# Altium footprint library Footprint-Lib-PhilsLab.PcbLib: 544 footprints (part 26 of 34)
Each footprint in its own frame and in the unit in brackets; x right, y up, seen from the top. Pads: shape width x height; smd on the part's side, far side on the other; paste and mask are expansions set on the pad; w line width, h text height; cw(c..) or ccw(c..) is an arc to the next point about the centre after c.
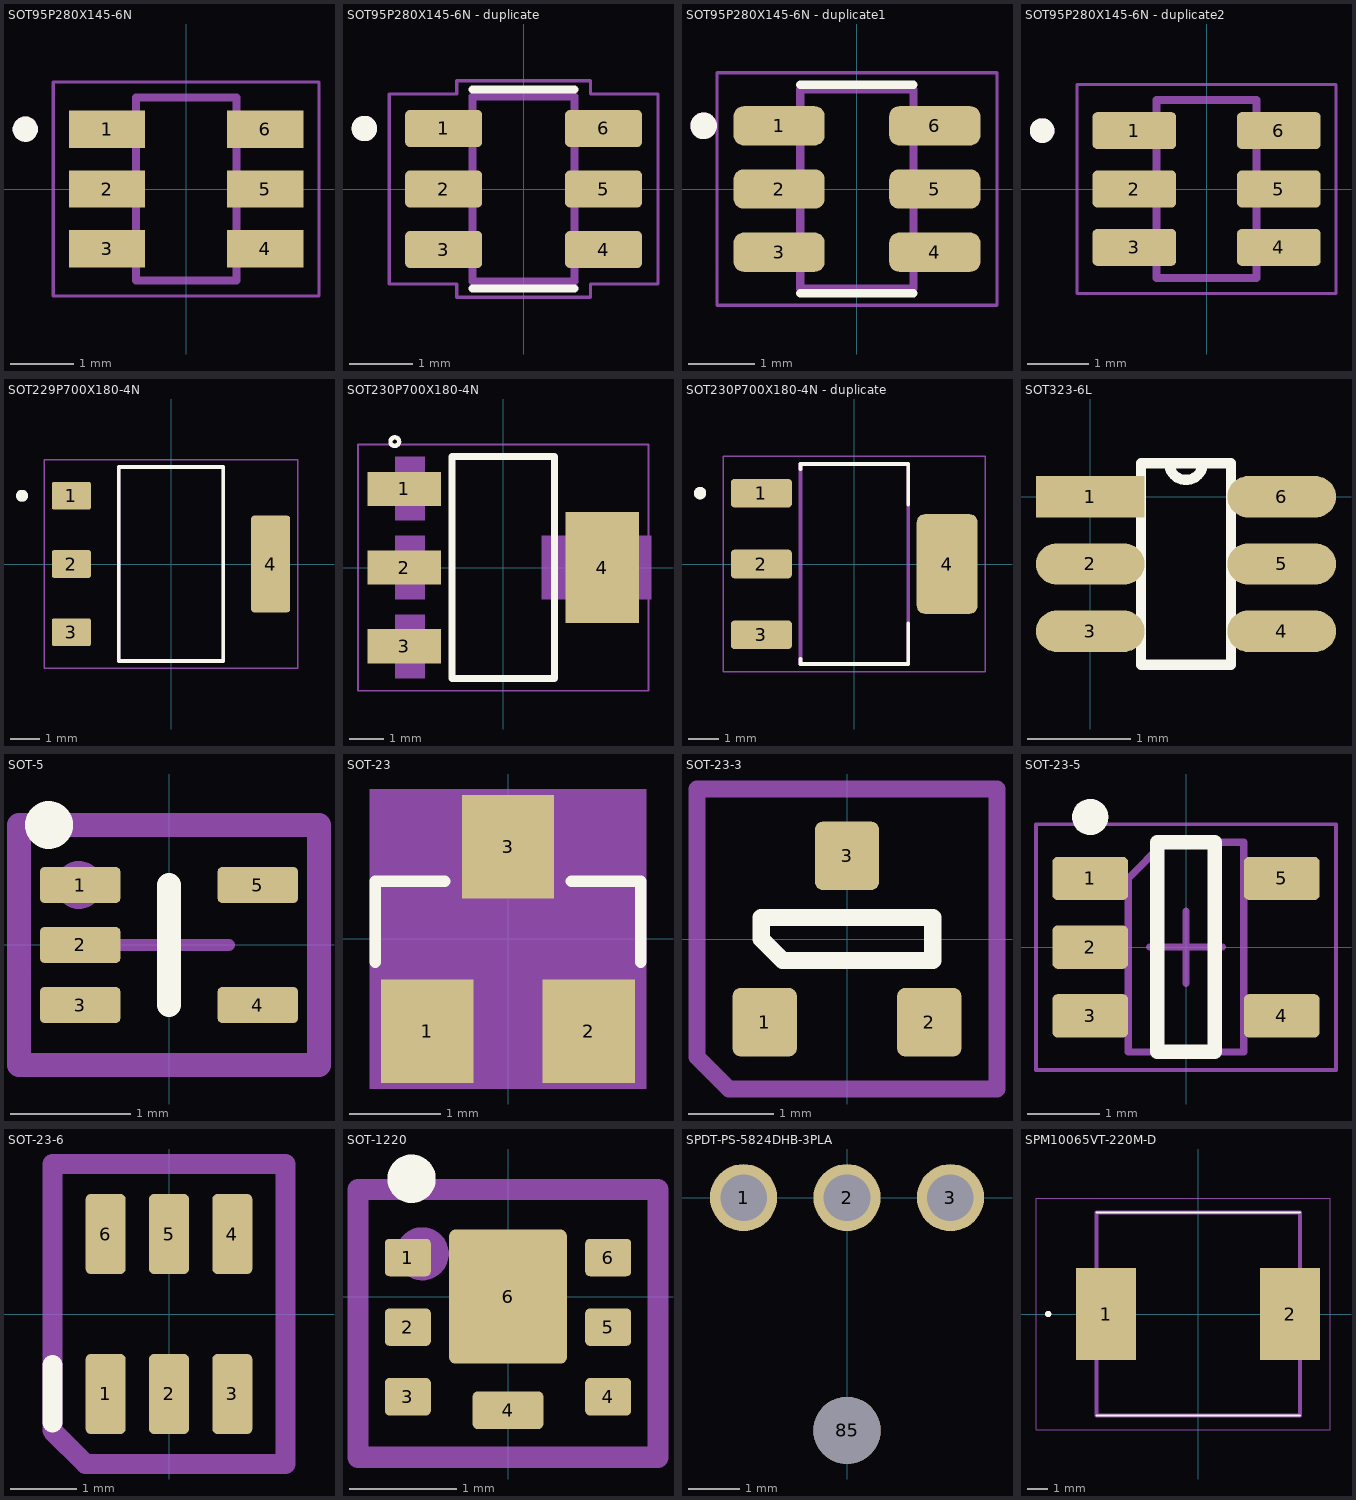
[diagram p25: the footprints below, top view; thin cyan lines are the x and y axes]

## SOT95P280X145-6N [mm]
height 1.45
pads (6):
  rect 1.21x0.59 smd: 1(-1.255,0.95) 2(-1.255,0) 3(-1.255,-0.95) 4(1.255,-0.95) 5(1.255,0) 6(1.255,0.95)
Top Overlay:
  circle w0.2: c-2.555,0.95 r0.1
Mechanical 13:
  circle w0.2: c-2.555,0.95 r0.1
  lines w0.127: -0.8,-1.45 0.8,-1.45 0.8,1.45 -0.8,1.45 -0.8,-1.45
Mechanical 15:
  lines w0.05: -2.11,-1.7 -2.11,1.7 2.11,1.7 2.11,-1.7 -2.11,-1.7
3D body "step_temp.STEP": height 1.45, standoff 0, extent -1.4,-1.45 1.4,1.45

## SOT95P280X145-6N - duplicate [mm]
pads (6):
  rrect25% 1.21x0.58 smd: 1(-1.255,0.95) 2(-1.255,0) 3(-1.255,-0.95) 4(1.255,-0.95) 5(1.255,0) 6(1.255,0.95)
Top Overlay:
  circle w0.2: c-2.5,0.95 r0.1
  lines w0.127: -0.8,-1.56 0.8,-1.56 ; -0.8,1.56 0.8,1.56
Mechanical 13:
  circle w0.2: c-2.5,0.95 r0.1
  lines w0.127: -0.8,-1.45 0.8,-1.45 0.8,1.45 -0.8,1.45 -0.8,-1.45
Mechanical 15:
  lines w0.05: -2.11,-1.49 -1.05,-1.49 -1.05,-1.7 1.05,-1.7 1.05,-1.49 2.11,-1.49 2.11,1.49 1.05,1.49 1.05,1.7 -1.05,1.7 -1.05,1.49 -2.11,1.49 -2.11,-1.49
3D body "step_temp.STEP": height 1.45, standoff 0, extent -1.4,-1.45 1.4,1.45

## SOT95P280X145-6N - duplicate1 [mm]
height 1.45
pads (6):
  rrect50% 1.37x0.59 smd: 1(-1.17,0.95) 2(-1.17,0) 3(-1.17,-0.95) 4(1.17,-0.95) 5(1.17,0) 6(1.17,0.95)
Top Overlay:
  circle w0.2: c-2.305,0.95 r0.1
  lines w0.127: -0.85,-1.565 0.85,-1.565 ; -0.85,1.565 0.85,1.565
Mechanical 13:
  circle w0.2: c-2.305,0.95 r0.1
  lines w0.127: -0.85,-1.5 0.85,-1.5 0.85,1.5 -0.85,1.5 -0.85,-1.5
Mechanical 15:
  lines w0.05: -2.105,-1.75 2.105,-1.75 2.105,1.75 -2.105,1.75 -2.105,-1.75
3D body "step_temp.STEP": height 1.45, standoff 0, extent -1.4,-1.45 1.4,1.45

## SOT95P280X145-6N - duplicate2 [mm]
height 1.45
pads (6):
  rrect25% 1.36x0.6 smd paste+0 mask+0.102: 1(-1.175,0.95) 2(-1.175,0) 3(-1.175,-0.95) 4(1.175,-0.95) 5(1.175,0) 6(1.175,0.95)
Top Overlay:
  circle w0.2: c-2.675,0.95 r0.1
Mechanical 13:
  circle w0.2: c-2.675,0.95 r0.1
  lines w0.127: -0.813,-1.45 0.813,-1.45 0.813,1.45 -0.813,1.45 -0.813,-1.45
Mechanical 15:
  lines w0.05: -2.105,-1.7 -2.105,1.7 2.105,1.7 2.105,-1.7 -2.105,-1.7

## SOT229P700X180-4N [mm]
height 1.8
pads (4):
  rrect15% 1.31x0.93 smd: 1(-3.345,2.29) 2(-3.345,0) 3(-3.345,-2.29)
  rrect15% 1.31x3.24 smd: 4(3.345,0)
Top Overlay:
  circle w0.2: c-5,2.29 r0.1
  lines w0.127: -1.753,-3.253 1.753,-3.253 1.753,3.253 -1.753,3.253 -1.753,-3.253
Mechanical 13:
  circle w0.2: c-5,2.29 r0.1
  lines w0.127: -1.753,-3.253 1.753,-3.253 1.753,3.253 -1.753,3.253 -1.753,-3.253
Mechanical 15:
  lines w0.05: -4.25,-3.502 -4.25,3.502 4.25,3.502 4.25,-3.502 -4.25,-3.502
3D body "step_temp.STEP": height 1.8, standoff 0, extent -3.499,-3.251 3.499,3.251

## SOT230P700X180-4N [mm]
pads (4):
  rect 2.15x1 smd: 1(-2.9,2.3) 2(-2.9,0) 3(-2.9,-2.3)
  rect 2.15x3.25 smd: 4(2.9,0)
Top Overlay:
  circle w0.127: c-3.175,3.683 r0.127
  lines w0.203: -1.5,-3.25 1.5,-3.25 1.5,3.25 -1.5,3.25 -1.5,-3.25
Mechanical 13:
  region: 4.331,-0.928 1.131,-0.928 1.131,0.927 4.331,0.927
  region: -2.299,-0.927 -3.163,-0.927 -3.163,0.927 -2.299,0.927
  region: -2.299,1.385 -3.165,1.385 -3.165,3.238 -2.299,3.238
  region: -2.299,-3.239 -3.163,-3.239 -3.163,-1.384 -2.299,-1.384
  region: 4.331,-0.928 1.131,-0.928 1.131,0.927 4.331,0.927
  region: -2.299,-0.927 -3.162,-0.927 -3.162,0.927 -2.299,0.927
  region: -2.299,1.385 -3.163,1.385 -3.163,3.238 -2.299,3.238
  region: -2.299,-3.239 -3.163,-3.239 -3.163,-1.384 -2.299,-1.384
Mechanical 15:
  lines w0.05: -4.25,-3.6 4.25,-3.6 4.25,3.6 -4.25,3.6 -4.25,-3.6
3D body "step_temp.STEP": height 1.8, standoff 0, extent -3.25,-3.499 3.25,3.499

## SOT230P700X180-4N - duplicate [mm]
height 1.8
pads (4):
  rrect25% 1.98x0.93 smd: 1(-3.015,2.3) 2(-3.015,0) 3(-3.015,-2.3)
  rrect25% 1.98x3.23 smd: 4(3.015,0)
Top Overlay:
  circle w0.2: c-5.005,2.3 r0.1
  lines w0.127: -1.75,-3.085 -1.75,-3.25 1.75,-3.25 1.75,-1.935 ; -1.75,3.085 -1.75,3.25 1.75,3.25 1.75,1.935
Mechanical 13:
  circle w0.2: c-5.005,2.3 r0.1
  lines w0.127: -1.75,-3.25 -1.75,3.25 1.75,3.25 1.75,-3.25 -1.75,-3.25
Mechanical 15:
  lines w0.05: -4.255,-3.5 -4.255,3.5 4.255,3.5 4.255,-3.5 -4.255,-3.5
3D body "step_temp.STEP": height 1.8, standoff 0, extent -3.25,-3.499 3.25,3.499

## SOT323-6L [mm]
pads (6):
  rect 1.05x0.4 smd: 1(0,0)
  oval 1.05x0.4 smd: 2(0,-0.65) 3(0,-1.3) 4(1.85,-1.3) 5(1.85,-0.65) 6(1.85,0)
Top Overlay:
  lines w0.1: 0.49,-1.625 0.49,0.325 1.087,0.325 cw(c0.925,0.325) 0.763,0.325 1.36,0.325 1.36,-1.625 0.49,-1.625
3D body "SOT323-6L package...SLDPRT": height 0.8, standoff -0.1, extent 0.02,-2.13 1.82,0.77

## SOT-5 [mm] "SOT, 5-Leads, Body 1.60x1.60mm, Pitch 0.50mm, IPC Medium Density"
height 0.6
pads (5):
  rrect25% 0.67x0.3 smd mask+0.05: 1(-0.74,0.5) 2(-0.74,0) 3(-0.74,-0.5) 4(0.74,-0.5) 5(0.74,0.5)
Top Overlay:
  circle w0.2: c-1,1 r0.1
  lines w0.2: 0,-0.5 0,0.5
Mechanical 13:
  circle w0.2: c-0.75,0.5 r0.1
  lines w0.2: -1.25,-1 -1.25,1 1.25,1 1.25,-1 -1.25,-1
Mechanical 15:
  lines w0.05: -1.225,-1 -1.225,1 1.225,1 1.225,-1 -1.225,-1
  lines w0.1: -0.5,0 0.5,0 ; 0,-0.5 0,0.5
3D body "SOT-5.step": height 0.6, standoff 0, extent -0.8,-0.848 0.8,0.848

## SOT-23 [mil]
pads (3):
  rect 40x45 smd: 1(-35,-40) 2(35,-40) 3(0,40)
Top Overlay:
  lines w5: -57.5,-10 -57.5,25 -27.5,25 ; 27.5,25 57.5,25 57.5,-10
Mechanical 13:
  region: -28,-51 -46,-51 -46,-28 -28,-28
  region: 46,-51.01 28.01,-51.01 28.01,-28 46,-28
  region: 9,28 -9,28 -9,51 9,51
Mechanical 15:
  region: 60,-65.06 -60.06,-65.06 -60.06,65 60,65
3D body "step_temp.STEP": height 55.12, standoff 0, extent -57.09,-51.18 57.09,51.18

## SOT-23-3 [mm]
pads (3):
  rrect25% 0.75x0.8 smd: 1(-0.96,-0.97) 2(0.96,-0.97) 3(0,0.97)
Top Overlay:
  lines w0.2: -1,0 -1,0.25 1,0.25 1,-0.25 -0.75,-0.25 -1,0
Mechanical 13:
  lines w0.2: -1.75,-1.377 -1.377,-1.75 1.75,-1.75 1.75,1.75 -1.75,1.75 -1.75,-1.377
  text "'.Designator'" at -5.84,-0.925 h1
3D body "SOT-23-3.stp": height 1.01, standoff 0.01, extent -1.45,-1.1 1.45,1.2

## SOT-23-5 [mm] "SOT23, 5-Leads, Body 2,90x2,80mm, Pitch 0,95mm, IPC Medium Density"
height 1.45
pads (5):
  rrect25% 1.05x0.6 smd: 1(-1.325,0.95) 2(-1.325,0) 3(-1.325,-0.95) 4(1.325,-0.95) 5(1.325,0.95)
Top Overlay:
  circle w0.25: c-1.325,1.8 r0.125
  lines w0.2: -0.4,-1.45 0.4,-1.45 0.4,1.45 -0.4,1.45 -0.4,-1.45
Mechanical 13:
  lines w0.1: -0.8,-1.45 -0.8,0.95 -0.3,1.45 0.8,1.45 0.8,-1.45 -0.8,-1.45
Mechanical 15:
  lines w0.05: -2.075,-1.7 -2.075,1.7 2.075,1.7 2.075,-1.7 -2.075,-1.7
  lines w0.1: -0.5,0 0.5,0 ; 0,-0.5 0,0.5
3D body "SOT95P280X145-5N.step": height 1.45, standoff 0, extent -1.4,-1.45 1.4,1.45

## SOT-23-6 [mm]
pads (6):
  rrect25% 0.6x1.2 smd: 1(-0.95,-1.2) 2(0,-1.2) 3(0.95,-1.2) 4(0.95,1.2) 5(0,1.2) 6(-0.95,1.2)
Top Overlay:
  lines w0.3: -1.75,-1.628 -1.75,-0.761
Mechanical 13:
  lines w0.3: -1.75,-1.75 -1.75,0 -1.75,2.25 1.75,2.25 1.75,-2.25 -1.25,-2.25 -1.75,-1.75
  text "'.Designator'" at -5.84,-0.925 h1
3D body "SOT23-6.step": height 1.45, standoff 0, extent -1.45,-1.4 1.45,1.4

## SOT-1220 [mm]
pads (8):
  rrect25% 0.43x0.35 smd mask+0.05: 1(-0.935,0.365) 2(-0.935,-0.285) 3(-0.935,-0.935) 4(0.935,-0.935) 5(0.935,-0.285) 6(0.935,0.365)
  rrect25% 0.66x0.35 smd mask+0.12: 4(0,-1.06)
  rrect10% 1.1x1.25 smd mask+0.18: 6(0,0)
Top Overlay:
  circle w0.3: c-0.9,1.1 r0.075
Mechanical 13:
  circle w0.3: c-0.8,0.4 r0.097
  lines w0.2: -1.4,-1.5 -1.4,1 1.4,1 1.4,-1.5 -1.4,-1.5
  text ".Designator" at -4.998,-0.333 h1
3D body "SOT-1220-UDFN6B.STEP": height 0.61, standoff 0.01, extent -1,-1.287 1,0.713

## SPDT-PS-5824DHB-3PLA [mm]
pads (4):
  round 1.3 hole 0.9: 1(-2,0) 2(0,0) 3(2,0)
  round 1.3 hole 1.3: 85(0,-4.5)
3D body "push switch PS-5824DHB-3PLA.STEP": height 5.9, standoff -2.2, extent -2.9,-8.9 2.9,0.25

## SPM10065VT-220M-D [mm]
pads (2):
  rect 2.95x4.5 smd: 1(-4.525,0) 2(4.525,0)
Top Overlay:
  circle w0.2: c-7.375,0 r0.05
  lines w0.1: -5,-5 5,-5 ; -5,5 5,5
Mechanical 13:
  lines w0.2: -5,-5 -5,5 5,5 5,-5 -5,-5
  text "'.Designator'" at -5.84,-0.925 h1
Mechanical 15:
  lines w0.05: -7.975,-5.7 -7.975,5.7 6.5,5.7 6.5,-5.7 -7.975,-5.7
3D body "SPM10065VT-220M-D.stp": height 6.36, standoff 0.01, extent -5.25,-5 5.25,5